# EAGLE library part PI-CAMERA-MODULE-3 (library moto-safety)
PI-CAMERA-MODULE-3 Raspberry Pi Camera Module 3 (15-pin 1mm FPC). Pi 5 tarafi 22-pin: adaptor kablo gerekir. Kart: 25.0 x 24.0 mm - Guven: H STEP: raspberrypi.com Camera Module 3 STEP
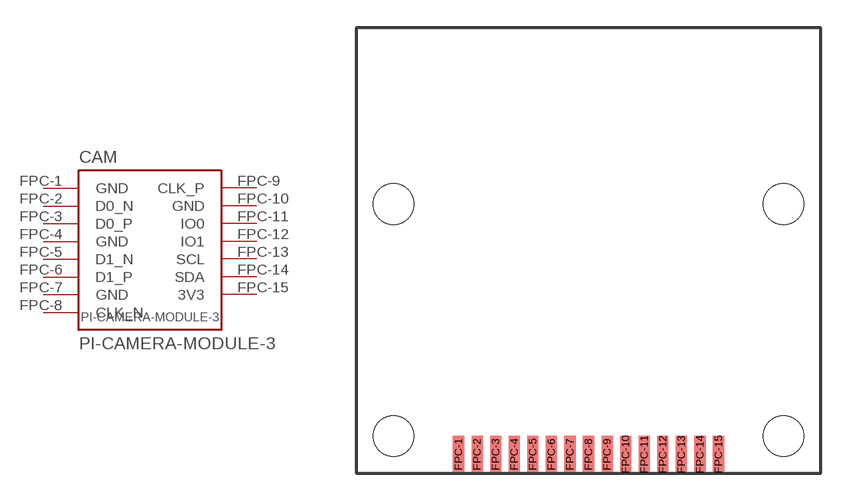
[diagram p3: symbol with the pads of PI-CAMERA-MODULE-3; footprint PI-CAMERA-MODULE-3]

Designator prefix CAM

## PI-CAMERA-MODULE-3 (BOARD_SIZE: 25.0x24.0mm; CONFIDENCE: H)  [PI-CAMERA-MODULE-3]
FPC-1  GND  pas
FPC-2  D0_N  pas
FPC-3  D0_P  pas
FPC-4  GND  pas
FPC-5  D1_N  pas
FPC-6  D1_P  pas
FPC-7  GND  pas
FPC-8  CLK_N  pas
FPC-9  CLK_P  pas
FPC-10  GND  pas
FPC-11  IO0  pas
FPC-12  IO1  pas
FPC-13  SCL  pas
FPC-14  SDA  pas
FPC-15  3V3  pas

## Footprint PI-CAMERA-MODULE-3 (pad centres in mm)
Raspberry Pi Camera Module 3 (15-pin 1mm FPC). Pi 5 tarafi 22-pin: adaptor kablo gerekir. | Kart: 25.0 x 24.0 mm | Guven: H
smd 0.6 x 2: FPC-1 -7,-11; FPC-2 -6,-11; FPC-3 -5,-11; FPC-4 -4,-11; FPC-5 -3,-11; FPC-6 -2,-11; FPC-7 -1,-11; FPC-8 0,-11; FPC-9 1,-11; FPC-10 2,-11; FPC-11 3,-11; FPC-12 4,-11; FPC-13 5,-11; FPC-14 6,-11; FPC-15 7,-11
hole 2.2 at -10.5,-10
hole 2.2 at 10.5,-10
hole 2.2 at -10.5,2.5
hole 2.2 at 10.5,2.5